# Altium footprint library PcbLib1.PcbLib: 335 footprints (part 12 of 22)
Each footprint in its own frame and in the unit in brackets; x right, y up, seen from the top. Pads: shape width x height; smd on the part's side, far side on the other; paste and mask are expansions set on the pad; w line width, h text height; cw(c..) or ccw(c..) is an arc to the next point about the centre after c.
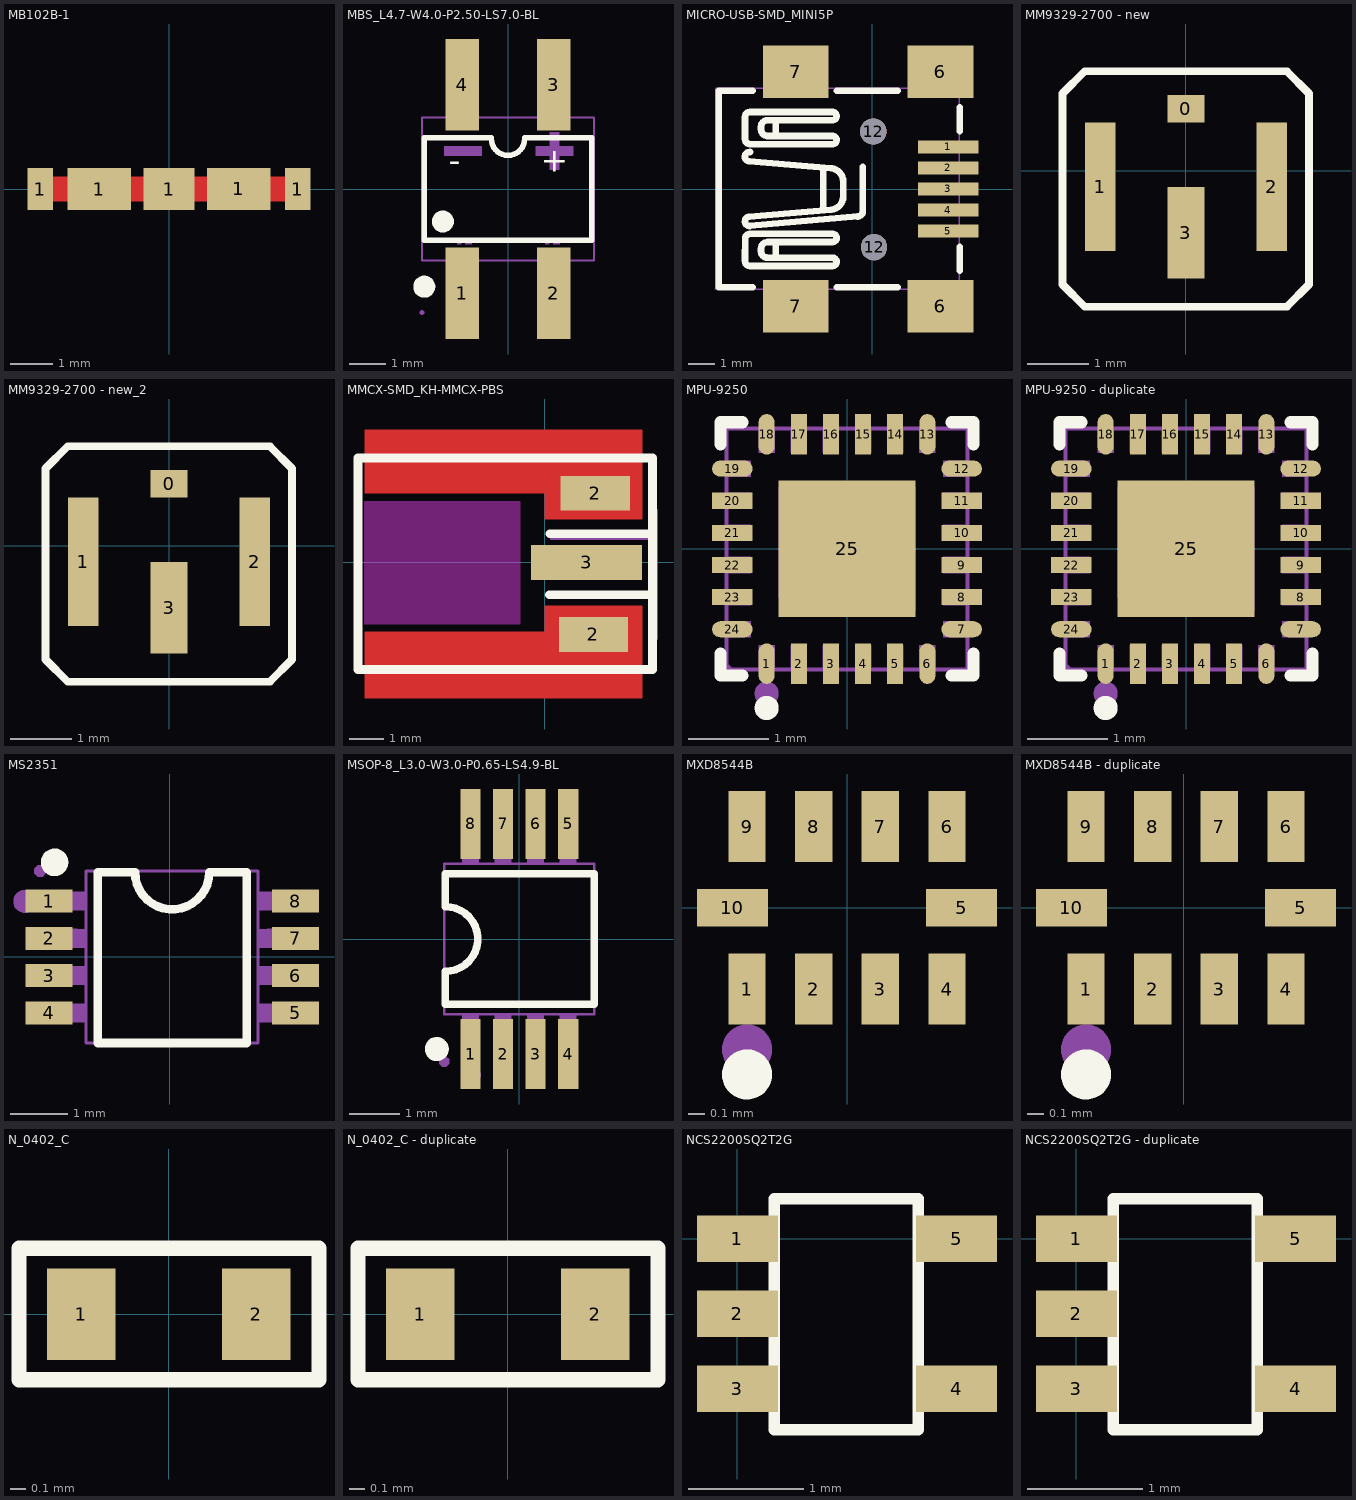
[diagram p11: the footprints below, top view; thin cyan lines are the x and y axes]

## MB102B-1 [mm]
pads (5):
  rect 0.6x1 smd: 1(-3.05,0) 1(3.05,0)
  rect 1.5x1 smd: 1(-1.65,0) 1(1.65,0)
  rect 1.2x1 smd: 1(0,0)
Top Layer:
  rectangle: -3.05,-0.3 3.05,0.3
Top Solder:
  rectangle: -2.775,-0.3 2.8,0.3

## MBS_L4.7-W4.0-P2.50-LS7.0-BL [mm]
pads (4):
  rect 0.91x2.495 smd paste+0 mask+0.051: 1(-1.25,-2.848) 2(1.25,-2.848) 3(1.25,2.848) 4(-1.25,2.848)
Top Overlay:
  circle w0.3: c-1.778,-0.889 r0.15
  circle w0.3: c-2.286,-2.667 r0.15
  lines w0.152: -0.457,1.371 ccw(c0,1.375) 0.457,1.371 ; -0.457,1.397 -2.286,1.397 -2.286,-1.397 2.286,-1.397 2.286,1.397 0.457,1.397
  text "+" at 0.889,0.474 h0.65
  text "-" at -1.611,0.474 h0.65
Mechanical 6:
  circle w0.3: c-1.25,-3.775 r0.15
  region: -0.988,-1.361 -0.952,-1.361 -0.952,-1.433 -0.988,-1.433
  region: -1.024,-1.361 -0.988,-1.361 -0.988,-1.505 -1.024,-1.505
  region: -1.06,-1.361 -1.024,-1.361 -1.024,-1.505 -1.06,-1.505
  region: -1.096,-1.433 -1.06,-1.433 -1.06,-1.505 -1.096,-1.505
  region: -1.132,-1.397 -1.096,-1.397 -1.096,-1.505 -1.132,-1.505
  region: -1.168,-1.397 -1.132,-1.397 -1.132,-1.505 -1.168,-1.505
  region: -1.204,-1.361 -1.168,-1.361 -1.168,-1.469 -1.204,-1.469
  region: -1.24,-1.361 -1.204,-1.361 -1.204,-1.469 -1.24,-1.469
  region: -1.276,-1.361 -1.24,-1.361 -1.24,-1.433 -1.276,-1.433
  region: -1.312,-1.361 -1.276,-1.361 -1.276,-1.505 -1.312,-1.505
  region: -1.348,-1.361 -1.312,-1.361 -1.312,-1.505 -1.348,-1.505
  region: -1.384,-1.397 -1.348,-1.397 -1.348,-1.505 -1.384,-1.505
  region: 1.412,-1.361 1.448,-1.361 1.448,-1.433 1.412,-1.433
  region: 1.376,-1.361 1.412,-1.361 1.412,-1.505 1.376,-1.505
  region: 1.34,-1.361 1.376,-1.361 1.376,-1.505 1.34,-1.505
  region: 1.304,-1.433 1.34,-1.433 1.34,-1.505 1.304,-1.505
  region: 1.268,-1.397 1.304,-1.397 1.304,-1.505 1.268,-1.505
  region: 1.232,-1.397 1.268,-1.397 1.268,-1.505 1.232,-1.505
  region: 1.196,-1.361 1.232,-1.361 1.232,-1.469 1.196,-1.469
  region: 1.16,-1.361 1.196,-1.361 1.196,-1.469 1.16,-1.469
  region: 1.124,-1.361 1.16,-1.361 1.16,-1.433 1.124,-1.433
  region: 1.088,-1.361 1.124,-1.361 1.124,-1.505 1.088,-1.505
  region: 1.052,-1.361 1.088,-1.361 1.088,-1.505 1.052,-1.505
  region: 1.016,-1.397 1.052,-1.397 1.052,-1.505 1.016,-1.505
  region: 1.651,0.913 0.762,0.913 0.762,1.167 1.778,1.167 1.778,0.913
  region: 1.397,1.421 1.397,0.532 1.143,0.532 1.143,1.548 1.397,1.548
  region: -0.849,0.913 -1.738,0.913 -1.738,1.167 -0.722,1.167 -0.722,0.913
Mechanical 15:
  region: -2.29,-3.375 -2.29,-3.35 -2.325,-3.315 -2.375,-3.315 -2.41,-3.35 -2.41,-3.375 -2.41,-3.4 -2.375,-3.435 -2.325,-3.435 -2.29,-3.4 -2.29,-3.375
  region: -1.575,-3.375 -1.575,-2.175 -0.925,-2.175 -0.925,-3.375
  region: -1.575,-2.185 -1.575,-1.79 -0.925,-1.79 -0.925,-2.185
  region: 0.925,-3.375 0.925,-2.175 1.575,-2.175 1.575,-3.375
  region: 0.925,-2.185 0.925,-1.79 1.575,-1.79 1.575,-2.185
  region: -1.575,3.375 -1.575,2.175 -0.925,2.175 -0.925,3.375
  region: -1.575,2.185 -1.575,1.79 -0.925,1.79 -0.925,2.185
  region: 0.925,3.375 0.925,2.175 1.575,2.175 1.575,3.375
  region: 0.925,2.185 0.925,1.79 1.575,1.79 1.575,2.185
  lines w0.051: -2.35,-1.95 -2.35,1.95 2.35,1.95 2.35,-1.95 -2.35,-1.95

## MICRO-USB-SMD_MINI5P [mm]
pads (12):
  rect 2.3x0.5 smd paste+0 mask+0.051: 1(2.9,1.6) 2(2.9,0.8) 3(2.9,0) 4(2.9,-0.8) 5(2.9,-1.6)
  rect 2.5x2 smd paste+0 mask+0.051: 6(2.6,-4.45) 6(2.6,4.45) 7(-2.9,-4.45) 7(-2.9,4.45)
  rrect50% 0x0 smd mask+0.102: 8(0,2.159)
  round 1 hole 1 paste-2539.97 mask+0.051: 12(0.051,2.184) 12(0.076,-2.21)
Top Overlay:
  drawing of 154 lines, arcs and shapes, not listed
Mechanical 15:
  region: 3.31,3.54 1.81,3.54 1.81,4.74 3.31,4.74
  region: -2.15,3.54 -3.65,3.54 -3.65,4.74 -2.15,4.74
  region: -2.15,-4.76 -3.65,-4.76 -3.65,-3.56 -2.15,-3.56
  region: 3.31,-4.76 1.81,-4.76 1.81,-3.56 3.31,-3.56
  region: 2.24,1.75 3.74,1.75 3.74,1.45 2.24,1.45
  region: 2.24,0.95 3.74,0.95 3.74,0.65 2.24,0.65
  region: 2.24,0.15 3.74,0.15 3.74,-0.15 2.24,-0.15
  region: 2.24,-0.65 3.74,-0.65 3.74,-0.95 2.24,-0.95
  region: 2.24,-1.45 3.74,-1.45 3.74,-1.75 2.24,-1.75
  region: 3.8,4.74 3.8,4.765 3.765,4.8 3.715,4.8 3.68,4.765 3.68,4.74 3.68,4.715 3.715,4.68 3.765,4.68 3.8,4.715 3.8,4.74
  lines w0.051: -5.95,-3.8 3.31,-3.81 3.31,3.74 3.23,3.82 -5.92,3.82 -5.94,3.8 -5.94,-3.79 -5.95,-3.8

## MM9329-2700 - new [mm] "MM9329-2700"
height 0.9
pads (4):
  rect 0.6x0.45 smd: 0(0,1.012)
  rect 0.5x2.1 smd: 1(-1.4,-0.262) 2(1.4,-0.262)
  rect 0.6x1.5 smd: 3(0,-1.012)
Top Overlay:
  lines w0.127: -2.016,-1.859 -2.016,-1.659 -2.016,1.262 -1.654,1.624 1.648,1.624 2.01,1.262 2.01,-1.659 2.01,-1.859 1.648,-2.221 -1.654,-2.221 -2.016,-1.859

## MM9329-2700 - new_2 [mm]
pads (4):
  rect 0.6x0.45 smd: 0(0,1.012)
  rect 0.5x2.1 smd: 1(-1.4,-0.262) 2(1.4,-0.262)
  rect 0.6x1.5 smd: 3(0,-1.012)
Top Overlay:
  lines w0.127: -2.016,-1.859 -2.016,-1.659 -2.016,1.262 -1.654,1.624 1.648,1.624 2.01,1.262 2.01,-1.659 2.01,-1.859 1.648,-2.221 -1.654,-2.221 -2.016,-1.859

## MMCX-SMD_KH-MMCX-PBS [mm]
pads (3):
  rect 2x1 smd: 2(1.4,-2.075) 2(1.45,2)
  rect 3.2x1 smd: 3(1.2,0)
Top Layer:
  region: -5.2,2 0,2 0,1.25 2.8,1.25 2.8,3.829 -5.2,3.829
  region: -5.2,-2 0,-2 0,-1.25 2.8,-1.25 2.8,-3.918 -5.2,-3.918
Top Overlay:
  lines w0.254: 0.13,-0.932 3.1,-0.932 ; 0.15,0.828 3.1,0.828 ; 3.1,3 3.1,-3.09 2.86,-3.09 -5.39,-3.09 -5.39,3.01 -4.19,3.01 3.1,3.01
Top Paste:
  region: -5.2,2 0,2 0,1.25 2.8,1.25 2.8,2.75 -5.2,2.75
  region: -5.2,-2 0,-2 0,-1.25 2.8,-1.25 2.8,-2.75 -5.2,-2.75
Top Solder:
  region: -5.2,2 0,2 0,1.25 2.8,1.25 2.8,3.829 -5.2,3.829
  region: -5.2,-2 0,-2 0,-1.25 2.8,-1.25 2.8,-3.918 -5.2,-3.918
Keep-Out Layer:
  board cut-out: -5.214,1.769 -5.214,-1.781 -0.718,-1.781 -0.718,1.769
Mechanical 15:
  region: 3.1,1.52 3.1,0.92 0.242,0.92 0.15,0.92 0.15,0.828 0.15,0.66 0.14,0.65 3.08,0.65 3.1,0.65 3.1,-0.87 0.192,-0.87 0.13,-0.87 0.13,-0.932 0.13,-1.03 0.13,-1.05 3.11,-1.06 3.11,-2.21 3.12,-2.22 3.24,-2.22 3.25,-2.23 3.25,1.51 3.26,1.52
3D body "mmcx-lr-smt.STEP": height 2.15, standoff -1.36, extent -5.2,-2.235 2.17,2.235

## MPU-9250 [mm]
pads (25):
  oval 0.2x0.505 smd mask+0.051: 1(-1,-1.427) 6(1,-1.427) 13(1,1.427) 18(-1,1.427)
  rect 0.2x0.505 smd mask+0.051: 2(-0.6,-1.427) 3(-0.2,-1.427) 4(0.2,-1.427) 5(0.6,-1.427) 14(0.6,1.427) 15(0.2,1.427) 16(-0.2,1.427) 17(-0.6,1.427)
  oval 0.505x0.2 smd mask+0.051: 7(1.427,-1) 12(1.427,1) 19(-1.427,1) 24(-1.427,-1)
  rect 0.505x0.2 smd mask+0.051: 8(1.427,-0.6) 9(1.427,-0.2) 10(1.427,0.2) 11(1.427,0.6) 20(-1.427,0.6) 21(-1.427,0.2) 22(-1.427,-0.2) 23(-1.427,-0.6)
  rect 1.7x1.7 smd mask+0.051: 25(0,0)
Top Overlay:
  circle w0.15: c-1,-1.98 r0.075
  lines w0.152: -1.576,-1.303 -1.576,-1.576 -1.303,-1.576 ; -1.576,1.303 -1.576,1.576 -1.303,1.576 ; 1.303,-1.576 1.576,-1.576 1.576,-1.303 ; 1.303,1.576 1.576,1.576 1.576,1.303
Mechanical 6:
  circle w0.15: c-1,-1.8 r0.075
Mechanical 15:
  region: -0.85,-0.616 -0.85,0.77 0.85,0.77 0.85,-0.77 -0.696,-0.77
  region: -1.2,-1.1 -1.2,-0.9 -1.5,-0.9 -1.5,-1.1
  region: -1.2,-0.7 -1.2,-0.5 -1.5,-0.5 -1.5,-0.7
  region: -1.2,-0.3 -1.2,-0.1 -1.5,-0.1 -1.5,-0.3
  region: -1.2,0.1 -1.2,0.3 -1.5,0.3 -1.5,0.1
  region: -1.2,0.5 -1.2,0.7 -1.5,0.7 -1.5,0.5
  region: -1.2,0.9 -1.2,1.1 -1.5,1.1 -1.5,0.9
  region: -1.1,1.5 -1.1,1.2 -0.9,1.2 -0.9,1.5
  region: -0.7,1.5 -0.7,1.2 -0.5,1.2 -0.5,1.5
  region: -0.3,1.5 -0.3,1.2 -0.1,1.2 -0.1,1.5
  region: 0.1,1.5 0.1,1.2 0.3,1.2 0.3,1.5
  region: 0.5,1.5 0.5,1.2 0.7,1.2 0.7,1.5
  region: 0.9,1.5 0.9,1.2 1.1,1.2 1.1,1.5
  region: 1.2,0.9 1.2,1.1 1.5,1.1 1.5,0.9
  region: 1.2,0.5 1.2,0.7 1.5,0.7 1.5,0.5
  region: 1.2,0.1 1.2,0.3 1.5,0.3 1.5,0.1
  region: 1.2,-0.3 1.2,-0.1 1.5,-0.1 1.5,-0.3
  region: 1.2,-0.7 1.2,-0.5 1.5,-0.5 1.5,-0.7
  region: 1.2,-1.1 1.2,-0.9 1.5,-0.9 1.5,-1.1
  region: 0.9,-1.5 0.9,-1.2 1.1,-1.2 1.1,-1.5
  region: 0.5,-1.5 0.5,-1.2 0.7,-1.2 0.7,-1.5
  region: 0.1,-1.5 0.1,-1.2 0.3,-1.2 0.3,-1.5
  region: -0.3,-1.5 -0.3,-1.2 -0.1,-1.2 -0.1,-1.5
  region: -0.7,-1.5 -0.7,-1.2 -0.5,-1.2 -0.5,-1.5
  region: -1.1,-1.5 -1.1,-1.2 -0.9,-1.2 -0.9,-1.5
  region: -1.44,-1.5 -1.44,-1.475 -1.475,-1.44 -1.525,-1.44 -1.56,-1.475 -1.56,-1.5 -1.56,-1.525 -1.525,-1.56 -1.475,-1.56 -1.44,-1.525 -1.44,-1.5
  lines w0.051: -1.5,-1.5 1.5,-1.5 1.5,1.5 -1.5,1.5 -1.5,-1.5

## MPU-9250 - duplicate [mm]
pads (25):
  oval 0.2x0.505 smd mask+0.051: 1(-1,-1.427) 6(1,-1.427) 13(1,1.427) 18(-1,1.427)
  rect 0.2x0.505 smd mask+0.051: 2(-0.6,-1.427) 3(-0.2,-1.427) 4(0.2,-1.427) 5(0.6,-1.427) 14(0.6,1.427) 15(0.2,1.427) 16(-0.2,1.427) 17(-0.6,1.427)
  oval 0.505x0.2 smd mask+0.051: 7(1.427,-1) 12(1.427,1) 19(-1.427,1) 24(-1.427,-1)
  rect 0.505x0.2 smd mask+0.051: 8(1.427,-0.6) 9(1.427,-0.2) 10(1.427,0.2) 11(1.427,0.6) 20(-1.427,0.6) 21(-1.427,0.2) 22(-1.427,-0.2) 23(-1.427,-0.6)
  rect 1.7x1.7 smd mask+0.051: 25(0,0)
Top Overlay:
  circle w0.15: c-1,-1.98 r0.075
  lines w0.152: -1.576,-1.303 -1.576,-1.576 -1.303,-1.576 ; -1.576,1.303 -1.576,1.576 -1.303,1.576 ; 1.303,-1.576 1.576,-1.576 1.576,-1.303 ; 1.303,1.576 1.576,1.576 1.576,1.303
Mechanical 6:
  circle w0.15: c-1,-1.8 r0.075
Mechanical 15:
  region: -0.85,-0.616 -0.85,0.77 0.85,0.77 0.85,-0.77 -0.696,-0.77
  region: -1.2,-1.1 -1.2,-0.9 -1.5,-0.9 -1.5,-1.1
  region: -1.2,-0.7 -1.2,-0.5 -1.5,-0.5 -1.5,-0.7
  region: -1.2,-0.3 -1.2,-0.1 -1.5,-0.1 -1.5,-0.3
  region: -1.2,0.1 -1.2,0.3 -1.5,0.3 -1.5,0.1
  region: -1.2,0.5 -1.2,0.7 -1.5,0.7 -1.5,0.5
  region: -1.2,0.9 -1.2,1.1 -1.5,1.1 -1.5,0.9
  region: -1.1,1.5 -1.1,1.2 -0.9,1.2 -0.9,1.5
  region: -0.7,1.5 -0.7,1.2 -0.5,1.2 -0.5,1.5
  region: -0.3,1.5 -0.3,1.2 -0.1,1.2 -0.1,1.5
  region: 0.1,1.5 0.1,1.2 0.3,1.2 0.3,1.5
  region: 0.5,1.5 0.5,1.2 0.7,1.2 0.7,1.5
  region: 0.9,1.5 0.9,1.2 1.1,1.2 1.1,1.5
  region: 1.2,0.9 1.2,1.1 1.5,1.1 1.5,0.9
  region: 1.2,0.5 1.2,0.7 1.5,0.7 1.5,0.5
  region: 1.2,0.1 1.2,0.3 1.5,0.3 1.5,0.1
  region: 1.2,-0.3 1.2,-0.1 1.5,-0.1 1.5,-0.3
  region: 1.2,-0.7 1.2,-0.5 1.5,-0.5 1.5,-0.7
  region: 1.2,-1.1 1.2,-0.9 1.5,-0.9 1.5,-1.1
  region: 0.9,-1.5 0.9,-1.2 1.1,-1.2 1.1,-1.5
  region: 0.5,-1.5 0.5,-1.2 0.7,-1.2 0.7,-1.5
  region: 0.1,-1.5 0.1,-1.2 0.3,-1.2 0.3,-1.5
  region: -0.3,-1.5 -0.3,-1.2 -0.1,-1.2 -0.1,-1.5
  region: -0.7,-1.5 -0.7,-1.2 -0.5,-1.2 -0.5,-1.5
  region: -1.1,-1.5 -1.1,-1.2 -0.9,-1.2 -0.9,-1.5
  region: -1.44,-1.5 -1.44,-1.475 -1.475,-1.44 -1.525,-1.44 -1.56,-1.475 -1.56,-1.5 -1.56,-1.525 -1.525,-1.56 -1.475,-1.56 -1.44,-1.525 -1.44,-1.5
  lines w0.051: -1.5,-1.5 1.5,-1.5 1.5,1.5 -1.5,1.5 -1.5,-1.5

## MS2351 [mm] "功率检测"
pads (8):
  rect 0.82x0.4 smd mask+0.051: 1(-2.11,0.97) 2(-2.11,0.321) 3(-2.11,-0.33) 4(-2.11,-0.98) 5(2.19,-0.98) 6(2.19,-0.33) 7(2.19,0.321) 8(2.19,0.97)
Top Overlay:
  circle w0.24: c-2.01,1.645 r0.12
  lines w0.15: -1.26,-1.505 -1.26,1.474 -0.608,1.474 ccw(c0.04,1.474) 0.687,1.474 1.34,1.474 1.34,-1.505 -1.26,-1.505
Mechanical 6:
  circle w0.2: c-2.53,0.965 r0.1
Mechanical 15:
  region: -2.26,1.395 -2.219,1.395 -2.16,1.454 -2.16,1.537 -2.219,1.595 -2.26,1.595 -2.302,1.595 -2.361,1.537 -2.361,1.454 -2.302,1.395 -2.26,1.395
  region: -1.614,-0.167 -1.614,-0.492 -2.26,-0.492 -2.26,-0.167
  region: -1.45,-0.168 -1.8,-0.168 -1.8,-0.492 -1.45,-0.492
  region: -1.614,-0.817 -1.614,-1.142 -2.26,-1.142 -2.26,-0.817
  region: -1.45,-0.818 -1.8,-0.818 -1.8,-1.142 -1.45,-1.142
  region: -1.614,0.483 -1.614,0.158 -2.26,0.158 -2.26,0.483
  region: -1.45,0.482 -1.8,0.482 -1.8,0.158 -1.45,0.158
  region: -1.614,1.133 -1.614,0.808 -2.26,0.808 -2.26,1.133
  region: -1.45,1.132 -1.8,1.132 -1.8,0.808 -1.45,0.808
  region: 1.693,-0.492 1.693,-0.167 2.34,-0.167 2.34,-0.492
  region: 1.53,-0.492 1.88,-0.492 1.88,-0.168 1.53,-0.168
  region: 1.693,-1.142 1.693,-0.817 2.34,-0.817 2.34,-1.142
  region: 1.53,-1.142 1.88,-1.142 1.88,-0.818 1.53,-0.818
  region: 1.693,0.158 1.693,0.483 2.34,0.483 2.34,0.158
  region: 1.53,0.158 1.88,0.158 1.88,0.482 1.53,0.482
  region: 1.693,0.808 1.693,1.133 2.34,1.133 2.34,0.808
  region: 1.53,0.808 1.88,0.808 1.88,1.132 1.53,1.132
  lines w0.051: -1.46,-1.505 1.54,-1.505 1.54,1.495 -1.46,1.495 -1.46,-1.505

## MSOP-8_L3.0-W3.0-P0.65-LS4.9-BL [mil]
pads (8):
  rect 15.98x55 smd mask+2: 1(-38.39,-90.55) 2(-12.8,-90.55) 3(12.8,-90.55) 4(38.39,-90.55) 5(38.39,90.55) 6(12.8,90.55) 7(-12.8,90.55) 8(-38.39,90.55)
Top Overlay:
  circle w9.45: c-64.96,-86.61 r4.72
  lines w5.91: -58.2,-51.18 59.05,-51.18 59.05,51.18 -58.2,51.18 -58.2,25.5 cw(c-58.2,0) -58.21,-25.5 -58.2,-51.18
Mechanical 6:
  circle w7.87: c-38.19,-107.09 r3.94
Mechanical 15:
  region: -32.01,58.66 -32.01,72.44 -44.76,72.44 -44.76,58.66
  region: -31.99,71 -44.78,71 -44.78,96.46 -31.99,96.46
  region: -6.42,58.66 -6.42,72.44 -19.17,72.44 -19.17,58.66
  region: -6.4,71 -19.2,71 -19.2,96.46 -6.4,96.46
  region: 44.77,58.66 44.77,72.44 32.01,72.44 32.01,58.66
  region: 44.78,71 31.99,71 31.99,96.46 44.78,96.46
  region: 19.18,58.66 19.18,72.44 6.42,72.44 6.42,58.66
  region: 19.19,71 6.4,71 6.4,96.46 19.19,96.46
  region: -44.76,-58.66 -44.76,-72.44 -32.01,-72.44 -32.01,-58.66
  region: -44.78,-71 -31.99,-71 -31.99,-96.46 -44.78,-96.46
  region: -19.17,-58.66 -19.17,-72.44 -6.42,-72.44 -6.42,-58.66
  region: -19.19,-71 -6.4,-71 -6.4,-96.46 -19.19,-96.46
  region: 32.01,-58.66 32.01,-72.44 44.77,-72.44 44.77,-58.66
  region: 31.99,-71 44.78,-71 44.78,-96.46 31.99,-96.46
  region: 6.42,-58.66 6.42,-72.44 19.17,-72.44 19.17,-58.66
  region: 6.4,-71 19.19,-71 19.19,-96.46 6.4,-96.46
  region: -55.11,-96.46 -55.11,-94.83 -57.42,-92.52 -60.68,-92.52 -62.99,-94.83 -62.99,-96.46 -62.99,-98.09 -60.68,-100.4 -57.42,-100.4 -55.11,-98.09 -55.11,-96.46
  lines w2: -59.05,-59.05 -59.05,59.05 59.05,59.05 59.05,-59.05 -59.05,-59.05

## MXD8544B [mm]
height 0.7
pads (10):
  rect 0.224x0.425 smd: 1(-0.6,-0.488) 2(-0.2,-0.488) 3(0.2,-0.488) 4(0.6,-0.488) 6(0.6,0.488) 7(0.2,0.488) 8(-0.2,0.488) 9(-0.6,0.488)
  rect 0.425x0.224 smd: 5(0.688,0) 10(-0.688,0)
Top Overlay:
  circle w0.15: c-0.6,-1 r0.075
Mechanical 15:
  circle w0.15: c-0.6,-0.85 r0.075

## MXD8544B - duplicate [mm]
pads (10):
  rect 0.224x0.425 smd: 1(-0.588,-0.488) 2(-0.188,-0.488) 3(0.212,-0.488) 4(0.612,-0.488) 6(0.612,0.488) 7(0.212,0.488) 8(-0.188,0.488) 9(-0.588,0.488)
  rect 0.425x0.224 smd: 5(0.7,0) 10(-0.675,0)
Top Overlay:
  circle w0.15: c-0.588,-1 r0.075
Mechanical 15:
  circle w0.15: c-0.588,-0.85 r0.075

## N_0402_C [mm]
height 2.54
pads (2):
  rect 0.45x0.6 smd: 1(-0.575,0) 2(0.575,0)
Top Overlay:
  lines w0.1: -0.985,-0.431 -0.985,0.433 0.986,0.433 0.986,-0.431 -0.985,-0.431
3D body "0402 SMD Capacitor.step": height 0.2, standoff 0, extent -0.483,-0.3 0.518,0.3

## N_0402_C - duplicate [mm]
height 2.54
pads (2):
  rect 0.45x0.6 smd: 1(-0.575,0) 2(0.575,0)
Top Overlay:
  lines w0.1: -0.985,-0.431 0.986,-0.431 0.986,0.433 -0.985,0.433 -0.985,-0.431
3D body "0402 SMD Capacitor.step": height 0.2, standoff 0, extent -0.483,-0.3 0.518,0.3

## NCS2200SQ2T2G [mm] "Low Voltage Comparators"
height 22.2
pads (5):
  rect 0.7x0.4 smd: 1(0,0) 2(0,-0.65) 3(0,-1.3) 4(1.9,-1.3) 5(1.9,0)
Top Overlay:
  lines w0.1: 0.318,-1.655 1.568,-1.655 1.568,0.345 0.318,0.345 0.318,-1.655

## NCS2200SQ2T2G - duplicate [mm] "Low Voltage Comparators"
height 22.2
pads (5):
  rect 0.7x0.4 smd: 1(0,0) 2(0,-0.65) 3(0,-1.3) 4(1.9,-1.3) 5(1.9,0)
Top Overlay:
  lines w0.1: 0.318,-1.655 0.318,0.345 1.568,0.345 1.568,-1.655 0.318,-1.655